# EAGLE library part EE16 (library madhu)
EE16 ferrite transformer
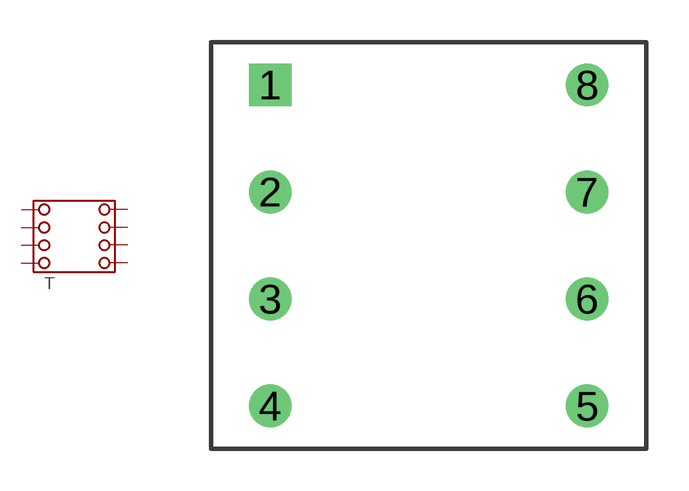
[diagram p40: symbol with the pads of EE16; footprint EE16]

Designator prefix T

## EE16  [EE16]
1  1
2  2
3  3
4  4
5  5
6  6
7  7
8  8

## Footprint EE16 (pad centres in mm)
EE16 ferrite transformer
drill 1.016 square: 1 -5.639,3.81
drill 1.016: 2 -5.639,0; 3 -5.639,-3.81; 4 -5.639,-7.62; 5 5.639,-7.62; 6 5.639,-3.81; 7 5.639,0; 8 5.639,3.81